# Altium schematic symbol library fin-microphone.SCHLIB: 13 symbols
Pins are listed as number, name and electrical type; pins without a type are passive.

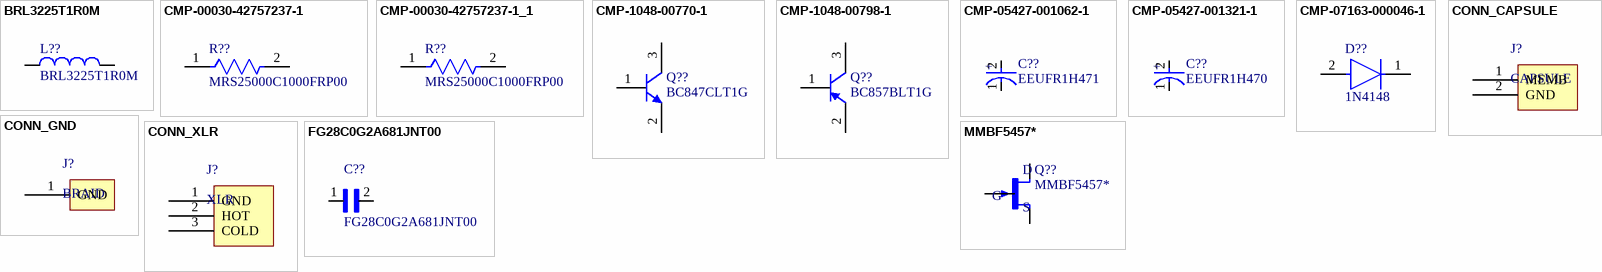
[diagram p0: symbols BRL3225T1R0M to MMBF5457*]

## BRL3225T1R0M
designator L??
1 ÂµH Semi-Shielded Drum Core, Wirewound Inductor 2.2 A 51.6mOhm Max 1210 (3225 Metric); MF: Taiyo Yuden; SnapEDA_Link: https://www.snapeda.com/parts/BRL3225T1R0M/Taiyo+Yuden/view-part/?ref=snap; Package: 3225 Taiyo Yuden; Value: *; MP: BRL3225T1R0M; Check_prices: https://www.snapeda.com/parts/BRL3225T1R0M/Taiyo+Yuden/view-part/?ref=eda
footprint INDC3225X170N
pins: 1, 2

## CMP-00030-42757237-1
designator R??, comment MRS25000C1000FRP00
MRS25000C1000FRP00 Resistor, 100 Ohm, ± 1%, 600 mW, Axial Leaded, Metal Film (Thin Film), Professional; NexarPartId: 42757237; Max Power Dissipation: 600mW; Resistance: 100Ω; Voltage Rating: 350V; Temperature Coefficient: 50ppm/°C; Lead Diameter: 600µm; RoHS: Compliant; Radiation Hardening: No; Schedule B: 8533210090, 8533210090; Length: 6.5mm; Packaging: Tape & Reel (TR); Number of Terminations: 2; Mount: Through Hole; Width: 2.5mm; Tolerance: 1%; Military Standard: Not; Voltage Rating (DC): 350V; Contact Plating: Tin; Number of Pins: 2; Max Operating Temperature: 155°C; Diameter: 2.5mm; Composition: Metal Film, Thin Film; REACH SVHC: Unknown; Power Rating: 600mW; Lead Free: Lead Free; Termination: Axial; Case/Package: Axial; Min Operating Temperature: -55°C
footprint FP-MRS25-MFG (Resistor 1K5 1%)
pins: 1, 2

## CMP-00030-42757237-1_1
designator R??, comment MRS25000C1000FRP00
MRS25000C1000FRP00 Resistor, 100 Ohm, ± 1%, 600 mW, Axial Leaded, Metal Film (Thin Film), Professional; NexarPartId: 42757237; Max Power Dissipation: 600mW; Resistance: 100Ω; Voltage Rating: 350V; Temperature Coefficient: 50ppm/°C; Lead Diameter: 600µm; RoHS: Compliant; Radiation Hardening: No; Schedule B: 8533210090, 8533210090; Length: 6.5mm; Packaging: Tape & Reel (TR); Number of Terminations: 2; Mount: Through Hole; Width: 2.5mm; Tolerance: 1%; Military Standard: Not; Voltage Rating (DC): 350V; Contact Plating: Tin; Number of Pins: 2; Max Operating Temperature: 155°C; Diameter: 2.5mm; Composition: Metal Film, Thin Film; REACH SVHC: Unknown; Power Rating: 600mW; Lead Free: Lead Free; Termination: Axial; Case/Package: Axial; Min Operating Temperature: -55°C
pins: 1, 2

## CMP-1048-00770-1
designator Q??, comment BC847CLT1G
General Purpose Transistor, NPN Silicon, 3-Pin SOT-23, Pb-Free, Tape and Reel; Manufacturer: On Semiconductor; IC Continuous (A): 0.1; fT Min (MHz): 100; ComponentLink1URL: http://www.onsemi.com/; ComponentLink3URL: http://www.onsemi.cn/pub_link/Collateral/318-08.PDF; PackageVersion: Rev. AP, 11/2009; RoHS: TRUE; Mounting Technology: Surface Mount; PackageDescription: 3-Pin Small Outline Transistor, Body 2.92 x 1.3 mm, Pitch 0.95 mm; Packing: Tape and Reel; DatasheetVersion: Rev. 11; ComponentLink1Description: Manufacturer URL; ComponentLink2Description: Datasheet; ComponentLink3Description: Package Specification; PackageReference: SOT-23-3-318-08; PartNumber: BC847CLT1G; ComponentLink2URL: http://www.onsemi.cn/pub_link/Collateral/BC846ALT1-D.PDF; Polarity: NPN
footprint ONSC-SOT-23-3-318-08_V (SOT23, 3-Leads, Body 2.92x1.3mm, Pitch 0.95mm)
pins: 1 B, 2 E, 3 C

## CMP-1048-00798-1
designator Q??, comment BC857BLT1G
General Purpose Transistor, PNP Silicon, 3-Pin SOT-23, Pb-Free, Tape and Reel; Manufacturer: On Semiconductor; IC Continuous (A): -0.1; fT Min (MHz): 100; Packing: Tape and Reel; ComponentLink1Description: Manufacturer URL; RoHS: TRUE; ComponentLink3Description: Package Specification; Polarity: PNP; ComponentLink3URL: http://www.onsemi.cn/pub_link/Collateral/318-08.PDF; DatasheetVersion: Rev. 13; PackageVersion: Rev. AP, 11/2009; PackageReference: SOT-23-3-318-08; PartNumber: BC857BLT1G; ComponentLink1URL: http://www.onsemi.com/; ComponentLink2URL: http://www.onsemi.cn/pub_link/Collateral/BC856ALT1-D.PDF; ComponentLink2Description: Datasheet; PackageDescription: 3-Pin Small Outline Transistor, Body 2.92 x 1.3 mm, Pitch 0.95 mm; Mounting Technology: Surface Mount
footprint ONSC-SOT-23-3-318-08_V (SOT23, 3-Leads, Body 2.92x1.3mm, Pitch 0.95mm)
pins: 1 B, 2 E, 3 C

## CMP-05427-001062-1
designator C??, comment EEUFR1H471
Aluminum Electrolytic Capacitors (Radial Lead Type) 470uF ±20% 50V; Ripple Current: 2.26A; Lead/Base Style: Straight; Lead Diameter: 0.6mm; Life (Hours): 10000Hour; Impedance: 22mR; Voltage Rating: 50V; RoHS Compliant: Yes; Max Operating Temperature: 105°C; Length: 20mm; Packaging: Bulk; Capacitance: 470uF; Height: 20mm; Ripple Current (AC): 2.26A; Lead Pitch: 5mm; Voltage: 50V; Termination: Radial; Tolerance: 20%; Lead Free: Lead Free; Case/Package: Radial; Series: FR; Features: General Purpose; Mount: Through Hole; Height - Seated (Max): 0.787inch; Construction: RADIAL; Package Quantity: 200; Number of Pins: 2; ESR (Equivalent Series Resistance): 22mR; Voltage Rating (DC): 50V; Radiation Hardening: No; Diameter: 12.5mm; Min Operating Temperature: -40°C
footprint FP-RAD-TH-D_12_5_0_5-L_20-MFG
pins: 1 C, 2 A
text: +

## CMP-05427-001321-1
designator C??, comment EEUFR1H470
Aluminum Electrolytic Capacitors (Radial Lead Type) 47uF ±20% 50V; Lead Diameter: 0.5mm; Ripple Current (AC): 405mA; Impedance: 140mR; Life (Hours): 5000Hour; Construction: RADIAL; REACH SVHC: Yes; Voltage: 50V; Packaging: Bulk; Series: FR Radial; Voltage Rating: 50V; Capacitance: 47uF; Termination: Radial; Diameter: 6.3mm; Ripple Current: 405mA; Max Operating Temperature: 105°C; Height: 11.2mm; Lead Pitch: 2.5mm; Tolerance: 20%; Min Operating Temperature: -40°C; RoHS Compliant: Yes; Case/Package: Radial
footprint FP-RAD-TH-D_6_3_0_5-L_11-MFG
pins: 1 C, 2 A
text: +

## CMP-07163-000046-1
designator D??, comment 1N4148
DIODE GEN PURP 100V 200MA DO35; Forward Voltage: 1V; Max Power Dissipation: 500mW; Max Reverse Current: 5uA; Forward Current: 300mA; Current: 4A; Reverse Recovery Time: 4ns; Element Configuration: Single; Outside Diameter: 1.85mm; Capacitance: 4pF; Polarity: Standard; Max Forward Surge Current (Ifsm): 1A; Reverse Voltage: 100V; Output Current: 200mA; Average Rectified Current: 200mA; Diameter: 1.91mm; Max Repetitive Reverse Voltage (Vrrm): 100V; Current Rating: 200mA; Case/Package: DO-35; Lead Free: Lead Free; Number of Pins: 2; Recovery Time: 4ns; Packaging: Bulk; Contact Plating: Tin; Voltage: 100V; Mount: Through Hole; Max Surge Current: 4A; Package Quantity: 2000; Width: 1.91mm; Max Reverse Voltage (DC): 100V; Length: 4.56mm; Radiation Hardening: No; Power Dissipation: 500mW; Voltage Rating (DC): 100V; Peak Non-Repetitive Surge Current: 4A; REACH SVHC: No SVHC; Height: 4.56mm; Max Operating Temperature: 175°C; Series: -; Weight: 0.01lb; Min Operating Temperature: -65°C
footprint FP-017AG-MFG
pins: 1 C, 2 A

## CONN_CAPSULE
designator J?, comment CAPSULE
Capsule wire pads (1 = membrane, 2 = backplate/GND).
footprint WIRE_CAPSULE_1x02
pins: 1 MEMB, 2 GND

## CONN_GND
designator J?, comment BRAID
Ground braid solder pad
footprint WIRE_GND_1x01
pins: 1 GND

## CONN_XLR
designator J?, comment XLR
XLR wire pads (1 = GND, 2 = HOT, 3 = COLD).
footprint WIRE_XLR_1x03
pins: 1 GND, 2 HOT, 3 COLD

## FG28C0G2A681JNT00
designator C??
MANUFACTURER: TDK; MAXIMUM_PACKAGE_HEIGHT: 0.0 mm; PARTREV: 20200310; SOURCE_URL: https://www.snapeda.com/parts/FG28C0G2A681JNT00/TDK/view-part/?ref=snap; STANDARD: IPC-7351B; Value: *
footprint *CAPRB500W50L400T250H550
pins: 1, 2

## MMBF5457*
designator Q??
JFET N-Channel 25 V 350 mW Surface Mount SOT-23-3; MF: ON Semiconductor; SnapEDA_Link: https://www.snapeda.com/parts/MMBF5457/Onsemi/view-part/?ref=snap; Package: SOT-23-3 ON Semiconductor; Value: *; MP: MMBF5457; Check_prices: https://www.snapeda.com/parts/MMBF5457/Onsemi/view-part/?ref=eda
footprint SOT23
pins: 1 D, 2 S, 3 G